# Altium footprint library SamacSys.PcbLib: 88 footprints (part 2 of 6)
Each footprint in its own frame and in the unit in brackets; x right, y up, seen from the top. Pads: shape width x height; smd on the part's side, far side on the other; paste and mask are expansions set on the pad; w line width, h text height; cw(c..) or ccw(c..) is an arc to the next point about the centre after c.
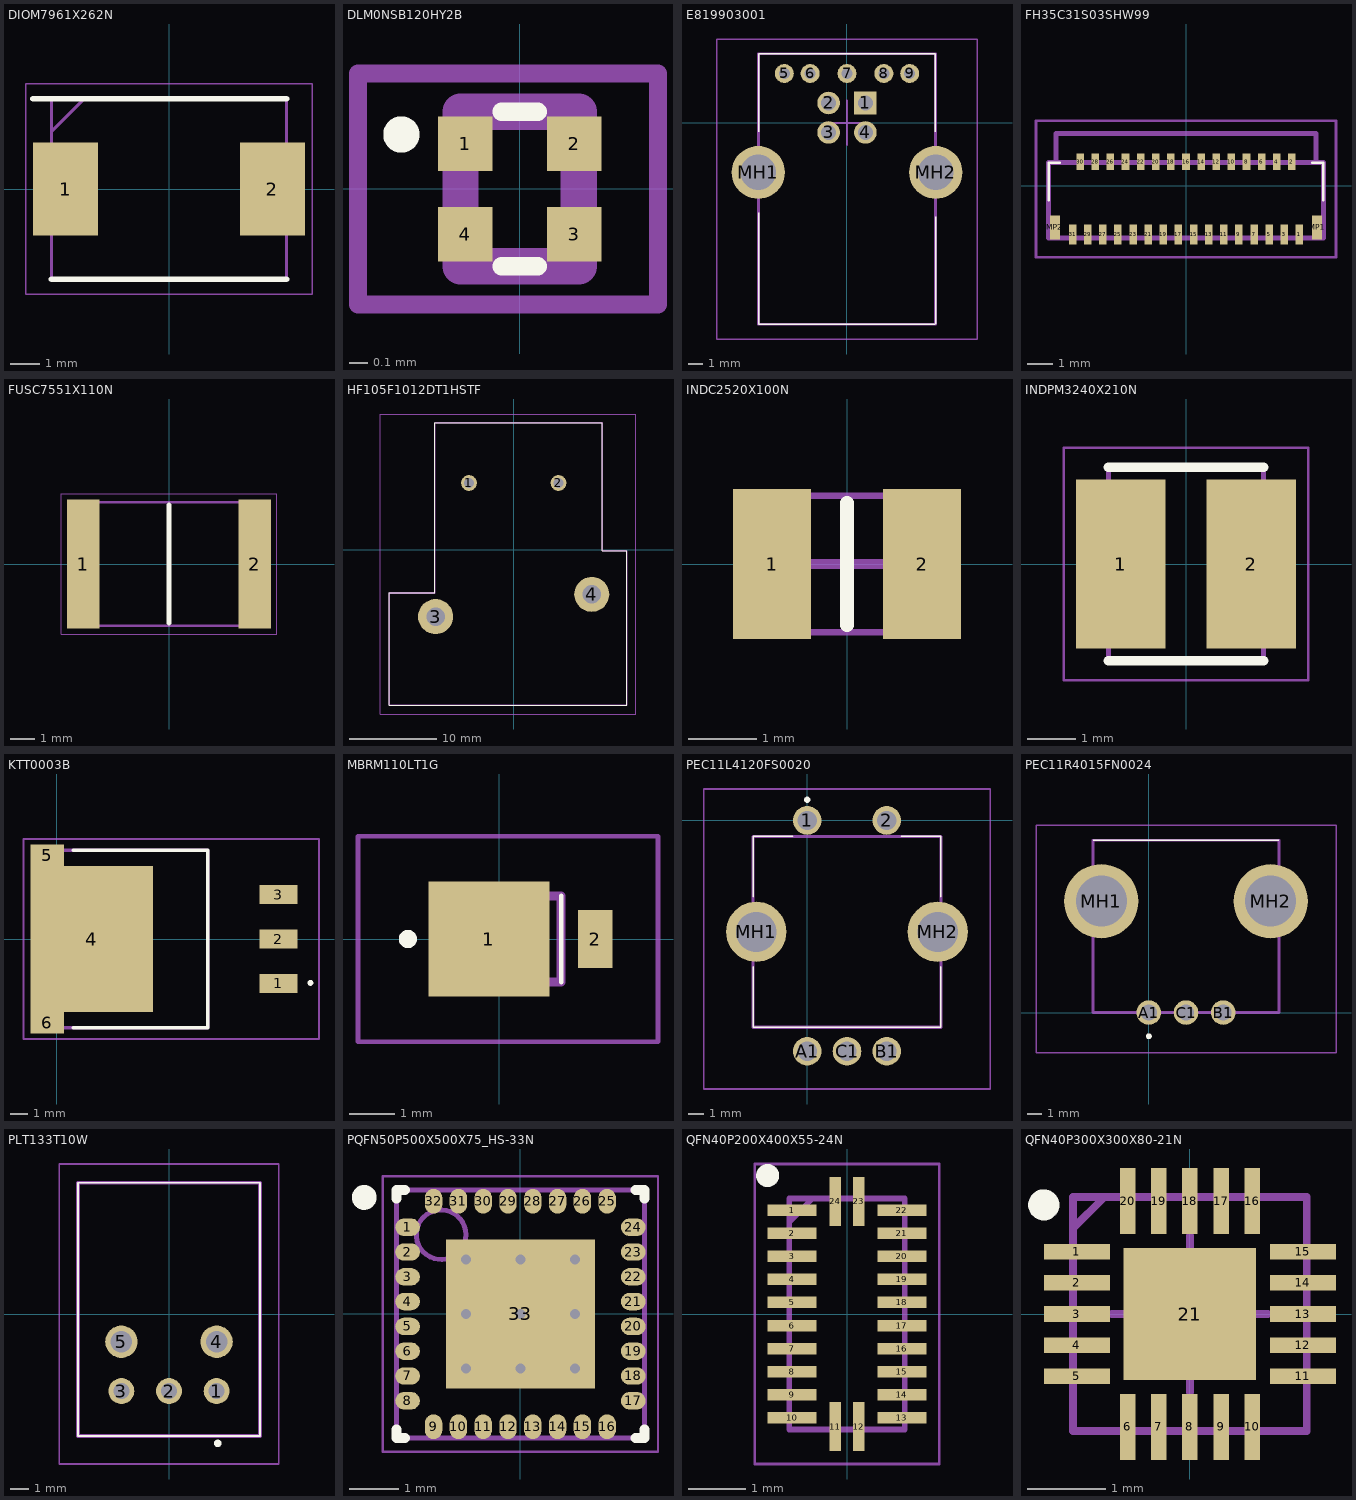
[diagram p1: the footprints below, top view; thin cyan lines are the x and y axes]

## DIOM7961X262N [mm]
pads (2):
  rect 2.2x3.15 smd: 1(-3.5,0) 2(3.5,0)
Top Overlay:
  lines w0.2: -4.6,3.052 3.97,3.052 ; -3.97,-3.052 3.97,-3.052
Body Extra:
  lines w0.1: -3.97,1.952 -2.87,3.052 ; -3.97,-3.052 3.97,-3.052 3.97,3.052 -3.97,3.052 -3.97,-3.052
Bottom Courtyard:
  lines w0.05: -4.85,-3.56 4.85,-3.56 4.85,3.56 -4.85,3.56 -4.85,-3.56
  text ".Designator" at -1.651,-0.381 h1.52
3D body "SS52.stp": height 2.62, standoff 0, extent -3.97,-3.053 3.97,3.053

## DLM0NSB120HY2B [mm]
pads (4):
  rect 0.3x0.3 smd: 1(-0.3,0.25) 2(0.3,0.25) 3(0.3,-0.25) 4(-0.3,-0.25)
Top Overlay:
  lines w0.1: -0.1,-0.425 0.1,-0.425 ; -0.1,0.425 0.1,0.425 ; -0.7,0.3 cw(c-0.65,0.3) -0.6,0.3 cw(c-0.65,0.3) -0.7,0.3
Body Extra:
  lines w0.2: -0.325,-0.425 0.325,-0.425 0.325,0.425 -0.325,0.425 -0.325,-0.425
Bottom Courtyard:
  lines w0.1: -0.889,-0.635 0.762,-0.635 0.762,0.635 -0.889,0.635 -0.889,-0.635
  text ".Designator" at -0.508,-0.127 h0.76
3D body "DLM0NSN900HY2D.stp": height 0.6, standoff 0, extent -0.42,-0.425 0.42,0.425

## E819903001 [mm]
pads (11):
  rect 1.53x1.53 hole 1.02: 1(1.25,1.355)
  round 1.53 hole 1.02: 2(-1.25,1.355) 3(-1.25,-0.645) 4(1.25,-0.645)
  round 1.286 hole 0.75: 5(-4.25,3.355) 6(-2.5,3.355) 7(0,3.355) 8(2.5,3.355) 9(4.25,3.355)
  round 3.6 hole 2.4: MH1(-6.02,-3.355) MH2(6.02,-3.355)
Top Overlay:
  lines w0.1: -6,-13.655 -6,-6.105 -6,-13.655 ; -6,-13.655 6,-13.655 -6,-13.655 ; -6,4.695 6,4.695 ; -6,4.695 6,4.695 ; -6,4.695 -6,-0.605 -6,4.695 ; 6,4.695 6,-0.605 6,4.695 ; 6.02,-13.605 6.02,-6.355 6.02,-13.605
Top Component Outline:
  lines w0.2: -6,-13.655 -6,4.695 6,4.695 6,-13.655 -6,-13.655
Top Component Center:
  lines w0.152: -1.5,0 1.5,0 ; 0,-1.5 0,1.5
Top Value:
  text "'.Comment'" at -4.385,-0.591 h2.03
Top Designator:
  text "'.Designator'" at -5.815,-0.425 h2.03
Bottom Courtyard:
  lines w0.1: -8.82,-14.655 -8.82,5.695 8.82,5.695 8.82,-14.655 -8.82,-14.655
3D body "USB3.0-typeB.STEP": height 13.06, standoff -3.92, extent -6.35,-13.62 6.25,4.73

## FH35C31S03SHW99 [mm]
pads (33):
  rect 0.3x0.8 smd: 1(4.5,-1.925) 3(3.9,-1.925) 5(3.3,-1.925) 7(2.7,-1.925) 9(2.1,-1.925) 11(1.5,-1.925) 13(0.9,-1.925) 15(0.3,-1.925) 17(-0.3,-1.925) 19(-0.9,-1.925) 21(-1.5,-1.925) 23(-2.1,-1.925) 25(-2.7,-1.925) 27(-3.3,-1.925) 29(-3.9,-1.925) 31(-4.5,-1.925)
  rect 0.3x0.65 smd: 2(4.2,0.95) 4(3.6,0.95) 6(3,0.95) 8(2.4,0.95) 10(1.8,0.95) 12(1.2,0.95) 14(0.6,0.95) 16(0,0.95) 18(-0.6,0.95) 20(-1.2,0.95) 22(-1.8,0.95) 24(-2.4,0.95) 26(-3,0.95) 28(-3.6,0.95) 30(-4.2,0.95)
  rect 0.4x0.95 smd: MP1(5.2,-1.65) MP2(-5.2,-1.65)
Top Overlay:
  lines w0.1: -5.45,-0.575 -5.45,0.925 -5,0.925 ; 5,0.925 5.45,0.925 5.45,-0.575
Body Extra:
  lines w0.2: -5.45,-2.075 -5.45,0.925 5.45,0.925 5.45,-2.075 -5.45,-2.075 ; -5.165,0.925 5.165,0.925 5.165,2.075 -5.165,2.075 -5.165,0.925
Bottom Courtyard:
  lines w0.1: -5.95,-2.825 -5.95,2.575 5.95,2.575 5.95,-2.825 -5.95,-2.825
  text ".Designator" at -2.159,-0.381 h1.52

## FUSC7551X110N [mm]
pads (2):
  rect 1.33x5.32 smd: 1(-3.545,0) 2(3.545,0)
Top Overlay:
  lines w0.2: 0,-2.45 0,2.45
Body Extra:
  lines w0.1: -3.75,-2.55 3.75,-2.55 3.75,2.55 -3.75,2.55 -3.75,-2.55
Bottom Courtyard:
  lines w0.05: -4.46,-2.91 4.46,-2.91 4.46,2.91 -4.46,2.91 -4.46,-2.91
  text ".Designator" at -1.397,-0.254 h1.52
3D body "ASMDC300F_24-2.stp": height 1.1, standoff 0, extent -3.75,-2.55 3.75,2.55

## HF105F1012DT1HSTF [mm]
pads (4):
  round 1.8 hole 1.1: 1(-5.1,7.62) 2(5.1,7.62)
  round 4 hole 2.1: 3(-8.9,-7.62) 4(8.9,-5.08)
Top Overlay:
  lines w0.1: -14.2,-17.72 12.9,-17.72 12.9,-0.12 10.1,-0.12 10.1,14.48 -9,14.48 -9,-4.92 -14.2,-4.92 -14.2,-17.72
Top Component Outline:
  lines w0.2: -14.2,-17.72 -14.2,-4.92 -9,-4.92 -9,14.48 10.1,14.48 10.1,-0.12 12.9,-0.12 12.9,-17.72 -14.2,-17.72
Top Value:
  text "'.Comment'" at -6.471,-0.872 h3
Top Designator:
  text "'.Designator'" at -8.58,-0.628 h3
Top Courtyard:
  lines w0.1: -15.2,-18.72 13.9,-18.72 13.9,15.48 -15.2,15.48 -15.2,-18.72
3D body "HF105F-1H[6].stp": height 19.5, standoff -3.6, extent -14.1,-17.48 12.9,14.32

## INDC2520X100N [mm]
pads (2):
  rect 1.15x2.2 smd: 1(-1.1,0) 2(1.1,0)
Top Overlay:
  lines w0.2: 0,-0.9 0,0.9
Top Component Outline:
  lines w0.1: -1.25,-1 -1.25,1 1.25,1 1.25,-1 -1.25,-1
Top Component Center:
  lines w0.152: -0.5,0 0.5,0 ; 0,-0.5 0,0.5
Top Value:
  text ".Comment" at -1.568,-0.142 h0.89
Top Designator:
  text "'.Designator'" at -2.907,-0.113 h1.02
3D body "MLP2520K1R0MT0S1.stp": height 1, standoff 0, extent -1.25,-1 1.25,1

## INDPM3240X210N [mm]
pads (2):
  rect 1.85x3.5 smd: 1(-1.35,0) 2(1.35,0)
Top Overlay:
  lines w0.2: -1.605,-2 1.605,-2 ; -1.605,2 1.605,2
Body Extra:
  lines w0.1: -1.605,-2 1.605,-2 1.605,2 -1.605,2 -1.605,-2
Bottom Courtyard:
  lines w0.05: -2.525,-2.4 2.525,-2.4 2.525,2.4 -2.525,2.4 -2.525,-2.4
  text ".Designator" at -1.143,-0.381 h1.52
3D body "XAL4020-222MEB.stp": height 2.1, standoff 0, extent -1.605,-2 1.605,2

## KTT0003B [mm]
pads (6):
  rect 2.16x1.07 smd: 1(12.67,-2.54) 2(12.67,0) 3(12.67,2.54)
  rect 7x8.33 smd: 4(2,0)
  rect 1.91x1.235 smd: 5(-0.545,4.782) 6(-0.545,-4.782)
Top Overlay:
  circle w0.2: c14.497,-2.51 r0.065
  lines w0.2: 0.94,-5.08 8.64,-5.08 8.64,5.08 0.94,5.08
Body Extra:
  lines w0.2: 0,-5.08 8.64,-5.08 8.64,5.08 0,5.08 0,-5.08
Bottom Courtyard:
  lines w0.1: -1.905,-5.715 -1.905,5.715 14.351,5.715 14.986,5.715 14.986,-5.715 -1.905,-5.715
  text ".Designator" at 3.81,-0.127 h1.52
3D body "LM1085ISX-3.3.stp": height 4.54, standoff 0, extent -1.517,-5.08 13.722,5.08

## MBRM110LT1G [mm]
pads (2):
  rect 2.67x2.54 smd: 1(-0.233,0)
  rect 0.762x1.27 smd: 2(2.118,0)
Top Overlay:
  lines w0.1: 1.362,-0.95 1.362,0.95
  lines w0.2: -2.018,-0.1 cw(c-2.018,0) -2.018,0.1 cw(c-2.018,0) -2.018,-0.1
Body Extra:
  lines w0.2: -0.818,-0.95 -0.818,0.95 1.362,0.95 1.362,-0.95 -0.818,-0.95
Bottom Courtyard:
  lines w0.1: -3.118,-2.27 -3.118,2.27 3.499,2.27 3.499,-2.27 -3.118,-2.27

## PEC11L4120FS0020 [mm]
pads (7):
  round 1.8 hole 1.2: 1(0,0) 2(5,0) A1(0,-14.5) B1(5,-14.5) C1(2.5,-14.5)
  round 3.786 hole 2.524: MH1(-3.2,-7) MH2(8.2,-7)
Top Overlay:
  lines w0.1: -3.4,-9.2 -3.4,-13 8.4,-13 8.4,-9.2 ; -3.4,-4.8 -3.4,-1 -0.9,-1 ; 5.9,-1 8.4,-1 8.4,-4.8
  lines w0.2: -0.1,1.3 ccw(c0,1.3) 0.1,1.3 ccw(c0,1.3) -0.1,1.3
Body Extra:
  lines w0.2: -3.4,-13 8.4,-13 8.4,-1 -3.4,-1 -3.4,-13
Bottom Courtyard:
  lines w0.1: -6.5,-16.875 11.5,-16.875 11.5,1.975 -6.5,1.975 -6.5,-16.875
  text ".Designator" at -0.254,-6.858 h1.52
3D body "PEC11R-4015F-N0024.stp": height 7.2, standoff -7.7, extent -7.635,-20.755 6.365,4.445

## PEC11R4015FN0024 [mm]
pads (5):
  round 1.65 hole 1.1: A1(0,0) B1(5,0) C1(2.5,0)
  round 5 hole 3.441: MH1(-3.2,7.5) MH2(8.2,7.5)
Top Overlay:
  lines w0.1: -3.75,11.6 8.75,11.6
  lines w0.2: 0,-1.7 ccw(c0,-1.6) 0,-1.5 ccw(c0,-1.6) 0,-1.7
Body Extra:
  lines w0.2: -3.75,0 -3.75,11.6 8.75,11.6 8.75,0 -3.75,0
Bottom Courtyard:
  lines w0.1: -7.6,-2.7 -7.6,12.6 12.6,12.6 12.6,-2.7 -7.6,-2.7
  text ".Designator" at -0.381,4.318 h1.52
3D body "PEC11R-4015F-N0024.stp": height 7.2, standoff -7.7, extent -4.729,-3.302 9.271,21.898

## PLT133T10W [mm]
pads (5):
  round 1.381 hole 0.85: 1(2.54,-4.11) 2(0,-4.11) 3(-2.54,-4.11)
  round 1.725 hole 1.15: 4(2.54,-1.48) 5(-2.54,-1.48)
Top Overlay:
  lines w0.1: -4.85,-6.5 -4.85,7 4.85,7 4.85,-6.5 -4.85,-6.5
  lines w0.2: 2.5,-6.9 ccw(c2.6,-6.9) 2.7,-6.9 ccw(c2.6,-6.9) 2.5,-6.9
Body Extra:
  lines w0.2: -4.85,-6.5 -4.85,7 4.85,7 4.85,-6.5 -4.85,-6.5
Bottom Courtyard:
  lines w0.1: -5.85,-8 -5.85,8 5.85,8 5.85,-8 -5.85,-8
3D body "PLT133_T10W.stp": height 10.1, standoff -5, extent -4.85,-6.5 4.85,7

## PQFN50P500X500X75_HS-33N [mm] "PQFN, 32-Leads, Body 5.00x5.00mm, Pitch 0.50mm, Thermal Pad 3.00x3.00mm, IPC Medium Density"
height 0.75
pads (33):
  oval 0.5x0.35 smd: 1(-2.275,1.75) 2(-2.275,1.25) 3(-2.275,0.75) 4(-2.275,0.25) 5(-2.275,-0.25) 6(-2.275,-0.75) 7(-2.275,-1.25) 8(-2.275,-1.75) 17(2.275,-1.75) 18(2.275,-1.25) 19(2.275,-0.75) 20(2.275,-0.25) 21(2.275,0.25) 22(2.275,0.75) 23(2.275,1.25) 24(2.275,1.75)
  oval 0.35x0.5 smd: 9(-1.75,-2.275) 10(-1.25,-2.275) 11(-0.75,-2.275) 12(-0.25,-2.275) 13(0.25,-2.275) 14(0.75,-2.275) 15(1.25,-2.275) 16(1.75,-2.275) 25(1.75,2.275) 26(1.25,2.275) 27(0.75,2.275) 28(0.25,2.275) 29(-0.25,2.275) 30(-0.75,2.275) 31(-1.25,2.275) 32(-1.75,2.275)
  rect 3x3 smd: 33(0,0)
via -1.1,1.1 diameter 0.5 hole 0.2
via 0,1.1 diameter 0.5 hole 0.2
via 1.1,1.1 diameter 0.5 hole 0.2
via -1.1,0 diameter 0.5 hole 0.2
via 0,0 diameter 0.5 hole 0.2
via 1.1,0 diameter 0.5 hole 0.2
via -1.1,-1.1 diameter 0.5 hole 0.2
via 0,-1.1 diameter 0.5 hole 0.2
via 1.1,-1.1 diameter 0.5 hole 0.2
Top Overlay:
  circle w0.25: c-3.15,2.35 r0.125
  lines w0.2: -2.5,-2.325 -2.5,-2.5 -2.325,-2.5 ; -2.5,2.325 -2.5,2.5 -2.325,2.5 ; 2.325,-2.5 2.5,-2.5 2.5,-2.325 ; 2.325,2.5 2.5,2.5 2.5,2.325
Top Courtyard:
  lines w0.05: -2.775,-2.775 -2.775,2.775 2.775,2.775 2.775,-2.775 -2.775,-2.775
  lines w0.1: -0.5,0 0.5,0 ; 0,-0.5 0,0.5
Top Assembly (Mech20):
  circle w0.1: c-1.6,1.6 r0.5
  lines w0.1: -2.5,-2.5 -2.5,2.5 2.5,2.5 2.5,-2.5 -2.5,-2.5
3D body: height 0.75, standoff 0, extent -2.5,-2.5 2.5,2.5

## QFN40P200X400X55-24N [mm]
pads (24):
  rect 0.85x0.2 smd: 1(-0.95,1.8) 2(-0.95,1.4) 3(-0.95,1) 4(-0.95,0.6) 5(-0.95,0.2) 6(-0.95,-0.2) 7(-0.95,-0.6) 8(-0.95,-1) 9(-0.95,-1.4) 10(-0.95,-1.8) 13(0.95,-1.8) 14(0.95,-1.4) 15(0.95,-1) 16(0.95,-0.6) 17(0.95,-0.2) 18(0.95,0.2) 19(0.95,0.6) 20(0.95,1) 21(0.95,1.4) 22(0.95,1.8)
  rect 0.2x0.85 smd: 11(-0.2,-1.95) 12(0.2,-1.95) 23(0.2,1.95) 24(-0.2,1.95)
Top Overlay:
  circle w0.2: c-1.375,2.4 r0.1
Body Extra:
  lines w0.1: -1,1.6 -0.6,2 ; -1,-2 -1,2 1,2 1,-2 -1,-2
Bottom Courtyard:
  lines w0.05: -1.6,-2.6 -1.6,2.6 1.6,2.6 1.6,-2.6 -1.6,-2.6
  text ".Designator" at -0.381,1.397 h1.52
3D body "TPD12S016RKTR.stp": height 0.55, standoff 0, extent -1.05,-2.05 1.05,2.05

## QFN40P300X300X80-21N [mm]
pads (21):
  rect 0.85x0.2 smd: 1(-1.45,0.8) 2(-1.45,0.4) 3(-1.45,0) 4(-1.45,-0.4) 5(-1.45,-0.8) 11(1.45,-0.8) 12(1.45,-0.4) 13(1.45,0) 14(1.45,0.4) 15(1.45,0.8)
  rect 0.2x0.85 smd: 6(-0.8,-1.45) 7(-0.4,-1.45) 8(0,-1.45) 9(0.4,-1.45) 10(0.8,-1.45) 16(0.8,1.45) 17(0.4,1.45) 18(0,1.45) 19(-0.4,1.45) 20(-0.8,1.45)
  rect 1.7x1.7 smd: 21(0,0)
Top Overlay:
  circle w0.2: c-1.875,1.4 r0.1
Top Component Outline:
  lines w0.1: -1.5,1.1 -1.1,1.5 ; -1.5,-1.5 1.5,-1.5 1.5,1.5 -1.5,1.5 -1.5,-1.5
Top Component Center:
  lines w0.1: -1,0 1,0 ; 0,-1 0,1
Top Value:
  text "'.Comment'" at -2.476,-0.342 h1.14
Top Designator:
  text "'.Designator'" at -3.648,-0.496 h1.27
3D body "N76E003AQ20.stp": height 0.8, standoff 0, extent -1.55,-1.55 1.55,1.55